# Altium footprint library FootPrintLib_0.PcbLib: 266 footprints (part 13 of 17)
Each footprint in its own frame and in the unit in brackets; x right, y up, seen from the top. Pads: shape width x height; smd on the part's side, far side on the other; paste and mask are expansions set on the pad; w line width, h text height; cw(c..) or ccw(c..) is an arc to the next point about the centre after c.
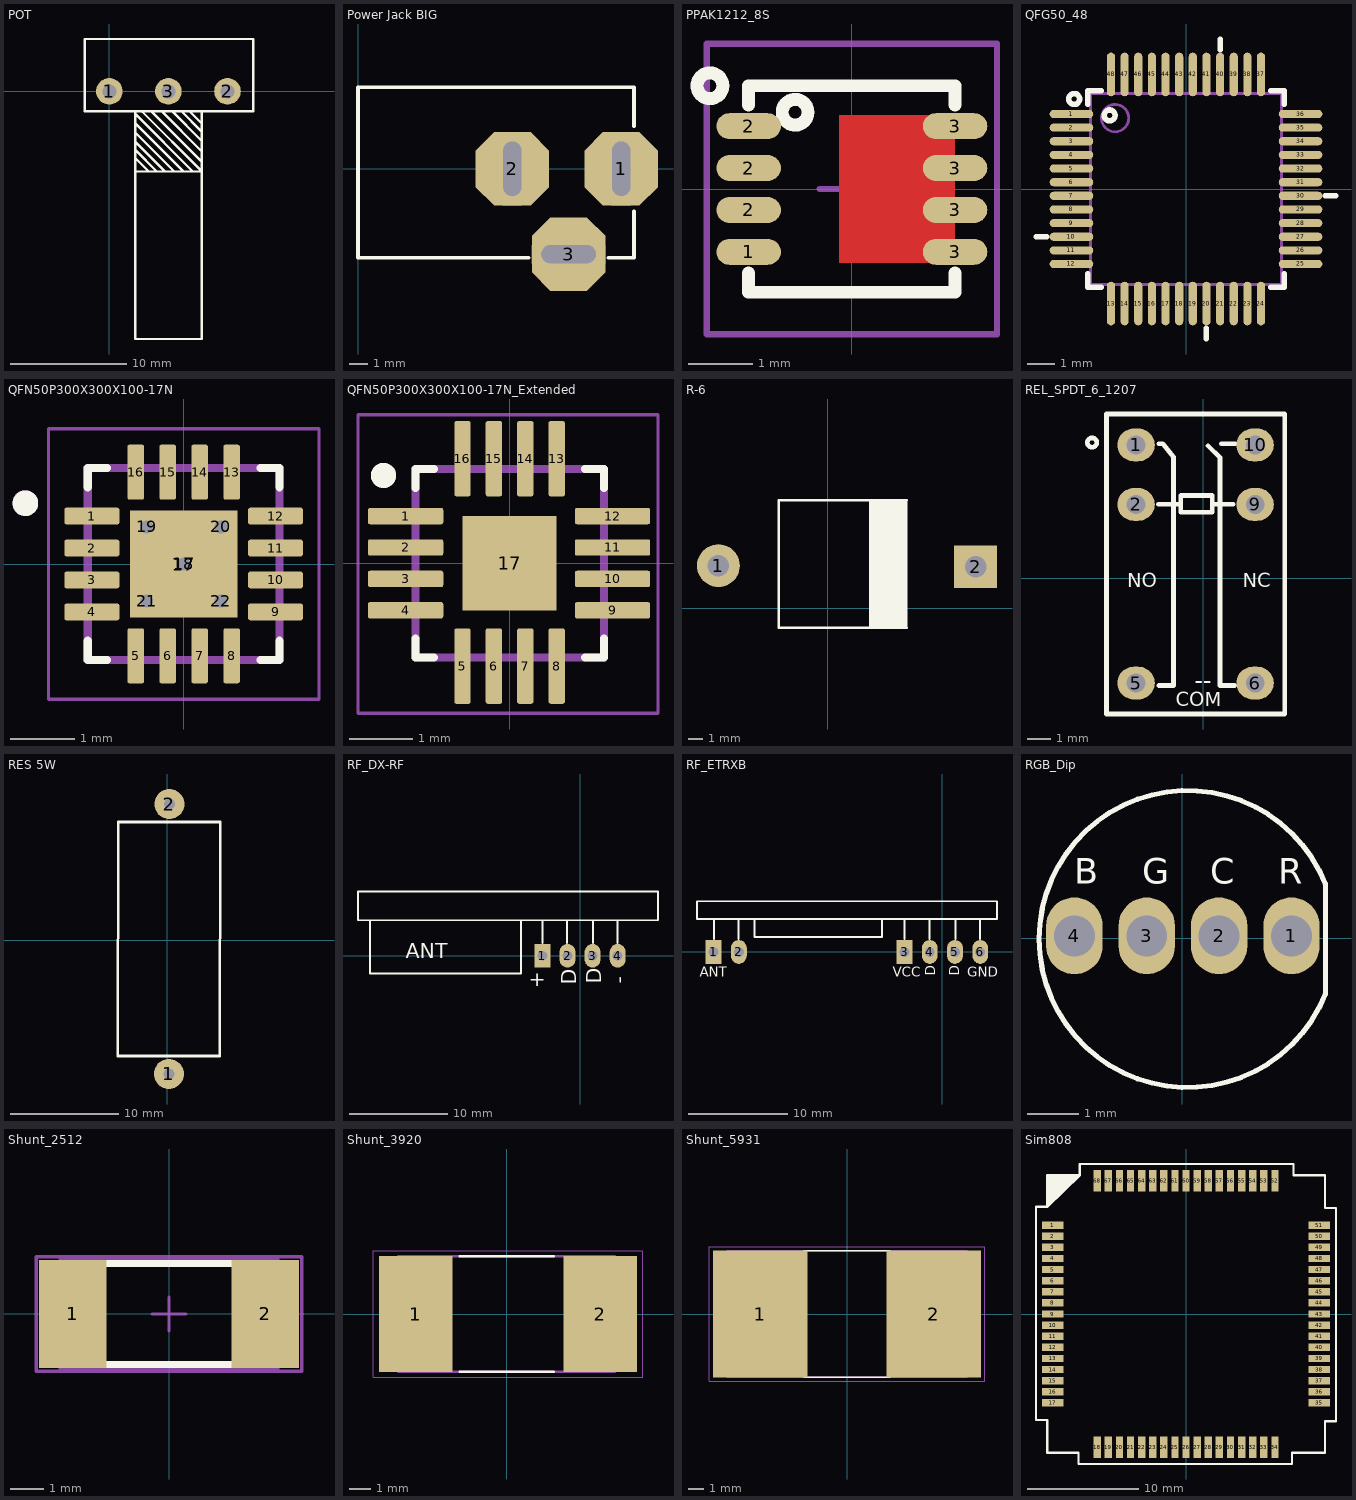
[diagram p12: the footprints below, top view; thin cyan lines are the x and y axes]

## POT [mil] "Voloume"
pads (3):
  round 90 hole 47.24: 1(0,0) 2(400,0) 3(200,0)
Top Overlay:
  lines w7.87: -83.46,177.17 -83.46,-66.93 487.4,-66.93 487.4,177.17 -79.53,177.17 ; 88.19,-271.65 312.6,-271.65 ; 89.76,-228.35 133.07,-271.65 ; 89.76,-200.79 160.63,-271.65 ; 89.76,-173.23 188.19,-271.65 ; 89.76,-141.73 219.69,-271.65 ; 89.76,-110.24 251.18,-271.65 ; 89.76,-78.74 280.71,-269.68 ; 111.42,-68.9 310.24,-267.72 ; 140.94,-66.93 310.24,-236.22 ; 176.38,-66.93 312.2,-202.76 ; 211.81,-66.93 310.24,-165.35 ; 243.31,-66.93 312.2,-135.83 ; 270.87,-66.93 310.24,-106.3 ; 88.19,-838.58 312.6,-838.58 312.6,-66.93 88.19,-66.93 88.19,-838.58
3D body "POT.STEP": height 39.37, standoff -929.98, extent -108.82,-812.91 511.18,193.31
3D body "volome cover2.STEP": height 926.22, standoff 252.56, extent -100.98,-1131.89 496.26,-344.49

## Power Jack BIG [mm] "Power Adaptor Jack"
pads (3):
  oct 4.05x4.05 hole 1 slot 3 at 90 deg: 1(14.5,0) 2(8.5,0)
  oct 4.05x4.05 hole 1 slot 3 at 0 deg: 3(11.6,-4.7)
Top Layer:
  region: 13.5,-1.525 14,-2.025 15,-2.025 15.5,-1.525 15.5,1.525 15,2.025 14,2.025 13.5,1.525
  region: 7.5,-1.525 8,-2.025 9,-2.025 9.5,-1.525 9.5,1.525 9,2.025 8,2.025 7.5,1.525
  region: 13.125,-5.7 13.625,-5.2 13.625,-4.2 13.125,-3.7 10.075,-3.7 9.575,-4.2 9.575,-5.2 10.075,-5.7
Bottom Layer:
  region: 13.5,-1.525 14,-2.025 15,-2.025 15.5,-1.525 15.5,1.525 15,2.025 14,2.025 13.5,1.525
  region: 7.5,-1.525 8,-2.025 9,-2.025 9.5,-1.525 9.5,1.525 9,2.025 8,2.025 7.5,1.525
  region: 13.125,-5.7 13.625,-5.2 13.625,-4.2 13.125,-3.7 10.075,-3.7 9.575,-4.2 9.575,-5.2 10.075,-5.7
Top Overlay:
  lines w0.2: 9.4,-4.9 0,-4.9 0,4.5 15.2,4.5 15.2,2.35 ; 13.8,-4.9 15.2,-4.9 15.2,-2.35
3D body "SW3dPS-PowerJack-2.5x5.7mm.STEP": height 11, standoff -3.5, extent 0,-4.9 15.2,4.5

## PPAK1212_8S [mm] "PowerPAK 1212-8, pitch: 0.65mm 3.3x3.3x1.1mm, PowerDI3333-8"
height 1.1
pads (8):
  oval 1x0.4 smd: 1(-1.6,-0.975) 2(-1.6,-0.325) 2(-1.6,0.325) 2(-1.6,0.975) 3(1.6,-0.975) 3(1.6,-0.325) 3(1.6,0.325) 3(1.6,0.975)
Top Layer:
  rectangle: -0.2,-1.15 1.6,1.15
Top Overlay:
  circle w0.2: c-2.2,1.6 r0.2
  circle w0.2: c-0.88,1.19 r0.2
  lines w0.2: -1.6,-1.3 -1.6,-1.6 1.6,-1.6 1.6,-1.3 ; -1.6,1.3 -1.6,1.6 1.6,1.6 1.6,1.3
Top Solder:
  rectangle: -0.25,-1.25 1.65,1.25
Mechanical 15:
  lines w0.1: -0.5,0 0.5,0 ; 0,-0.5 0,0.5 ; -2.25,-2.25 2.25,-2.25 2.25,2.25 -2.25,2.25 -2.25,-2.25
3D body "User Library-PowerPAK 1212-8-SiS892DN.step": height 1.04, standoff 0, extent -1.65,-1.65 1.65,1.65

## QFG50_48 [mm] "LQFP48, PQFF, PQFG, TSQFP, 48-Leads, Body 7.00x7.00mm, Pitch 0.50mm"
height 1.6
pads (48):
  oval 1.6x0.3 smd mask+0.05: 1(-4.2,2.75) 2(-4.2,2.25) 3(-4.2,1.75) 4(-4.2,1.25) 5(-4.2,0.75) 6(-4.2,0.25) 7(-4.2,-0.25) 8(-4.2,-0.75) 9(-4.2,-1.25) 10(-4.2,-1.75) 11(-4.2,-2.25) 12(-4.2,-2.75) 25(4.2,-2.75) 26(4.2,-2.25) 27(4.2,-1.75) 28(4.2,-1.25) 29(4.2,-0.75) 30(4.2,-0.25) 31(4.2,0.25) 32(4.2,0.75) 33(4.2,1.25) 34(4.2,1.75) 35(4.2,2.25) 36(4.2,2.75)
  oval 0.3x1.6 smd mask+0.05: 13(-2.75,-4.2) 14(-2.25,-4.2) 15(-1.75,-4.2) 16(-1.25,-4.2) 17(-0.75,-4.2) 18(-0.25,-4.2) 19(0.25,-4.2) 20(0.75,-4.2) 21(1.25,-4.2) 22(1.75,-4.2) 23(2.25,-4.2) 24(2.75,-4.2) 37(2.75,4.2) 38(2.25,4.2) 39(1.75,4.2) 40(1.25,4.2) 41(0.75,4.2) 42(0.25,4.2) 43(-0.25,4.2) 44(-0.75,4.2) 45(-1.25,4.2) 46(-1.75,4.2) 47(-2.25,4.2) 48(-2.75,4.2)
Top Overlay:
  circle w0.2: c-2.8,2.7 r0.2
  circle w0.2: c-4.1,3.3 r0.2
  lines w0.2: -5.5,-1.75 -5.1,-1.75 ; -3.6,-3.1 -3.6,-3.6 -3.1,-3.6 ; -3.6,3.1 -3.6,3.6 -3.1,3.6 ; 0.75,-5.5 0.75,-5.1 ; 1.25,5.1 1.25,5.5 ; 3.1,-3.6 3.6,-3.6 3.6,-3.1 ; 3.1,3.6 3.6,3.6 3.6,3.1 ; 5.1,-0.25 5.5,-0.25
Mechanical 13:
  circle w0.1: c-2.6,2.6 r0.5
  lines w0.1: -3.5,-3.5 3.5,-3.5 3.5,3.5 -3.5,3.5 -3.5,-3.5
3D body "LQFP48_Grid_0_5.STEP": height 1.6, standoff 0, extent -4.5,-4.5 4.5,4.5

## QFN50P300X300X100-17N [mm]
pads (22):
  rrect25% 0.86x0.26 smd: 1(-1.435,0.75) 2(-1.435,0.25) 3(-1.435,-0.25) 4(-1.435,-0.75) 9(1.435,-0.75) 10(1.435,-0.25) 11(1.435,0.25) 12(1.435,0.75)
  rrect25% 0.26x0.86 smd: 5(-0.75,-1.435) 6(-0.25,-1.435) 7(0.25,-1.435) 8(0.75,-1.435) 13(0.75,1.435) 14(0.25,1.435) 15(-0.25,1.435) 16(-0.75,1.435)
  rect 1.68x1.68 smd paste-0.31: 17(0,0)
  round 0.4 hole 0.2 mask+0: 18(0,0) 19(-0.58,0.58) 20(0.58,0.58) 21(-0.58,-0.58) 22(0.58,-0.58)
Top Overlay:
  circle w0.2: c-2.475,0.95 r0.1
  lines w0.127: -1.5,-1.2 -1.5,-1.5 -1.2,-1.5 ; -1.5,1.2 -1.5,1.5 -1.2,1.5 ; 1.2,-1.5 1.5,-1.5 1.5,-1.2 ; 1.2,1.5 1.5,1.5 1.5,1.2
Mechanical 13:
  circle w0.2: c-2.475,0.95 r0.1
  lines w0.127: -1.5,-1.5 1.5,-1.5 1.5,1.5 -1.5,1.5 -1.5,-1.5
Mechanical 15:
  lines w0.05: -2.115,-2.115 2.115,-2.115 2.115,2.115 -2.115,2.115 -2.115,-2.115
3D body "step_temp.STEP": height 1, standoff 0, extent -1.5,-1.5 1.5,1.5

## QFN50P300X300X100-17N_Extended [mm]
pads (17):
  rrect25% 1.2x0.26 smd: 1(-1.656,0.75) 2(-1.656,0.25) 3(-1.656,-0.25) 4(-1.656,-0.75) 9(1.638,-0.75) 10(1.638,-0.25) 11(1.638,0.25) 12(1.638,0.75)
  rrect25% 0.26x1.2 smd: 5(-0.75,-1.638) 6(-0.25,-1.638) 7(0.25,-1.638) 8(0.75,-1.638) 13(0.75,1.664) 14(0.25,1.664) 15(-0.25,1.664) 16(-0.75,1.664)
  rect 1.5x1.5 smd paste-0.31: 17(0,0)
Top Overlay:
  circle w0.2: c-2.007,1.397 r0.1
  lines w0.127: -1.5,-1.2 -1.5,-1.5 -1.2,-1.5 ; -1.5,1.2 -1.5,1.5 -1.2,1.5 ; 1.2,-1.5 1.5,-1.5 1.5,-1.2 ; 1.2,1.5 1.5,1.5 1.5,1.2
Mechanical 13:
  circle w0.2: c-2.007,1.397 r0.1
  lines w0.127: -1.5,-1.5 1.5,-1.5 1.5,1.5 -1.5,1.5 -1.5,-1.5
Mechanical 15:
  lines w0.05: -2.413,-2.388 2.362,-2.388 2.362,2.362 -2.413,2.362 -2.413,-2.388
3D body "step_temp.STEP": height 1, standoff 0, extent -1.5,-1.5 1.5,1.5

## R-6 [mm]
height 2.7
pads (2):
  round 3 hole 1.5: 1(-7.645,2.997)
  rect 3x3 hole 1.5: 2(10.338,2.921)
Top Overlay:
  region: 5.588,-1.38 5.588,7.62 2.888,7.62 2.888,-1.38
  lines w0.2: 5.5,-1.35 -3.429,-1.35 -3.429,7.573 5.5,7.573
3D body "User Library-R-6.step": height 9.55, standoff -2, extent -8.183,-1.448 10.897,7.652

## REL_SPDT_6_1207 [mm]
height 10
pads (6):
  oval 1.6x1.4 hole 0.8: 1(-2.87,5.69) 2(-2.87,3.15) 5(-2.87,-4.47) 6(2.21,-4.47) 9(2.21,3.15) 10(2.21,5.69)
Top Overlay:
  circle w0.2: c-4.75,5.791 r0.2
  lines w0.2: -1.93,3.154 -0.991,3.154 ; -1.906,-4.571 -1.271,-4.571 -1.271,-3.471 -1.271,4.029 -1.271,5.152 ; -1.904,5.736 -1.727,5.736 ; -1.701,5.71 -1.269,5.177 ; 0.198,5.657 0.719,5.136 ; 0.381,3.148 1.27,3.154 ; 0.711,5.152 0.711,4.029 0.711,-3.471 0.711,-4.571 1.346,-4.571 ; 0.765,5.736 1.375,5.736 ; -4.13,-5.79 -4.13,7.01 3.47,7.01 3.47,-5.79 -4.13,-5.79 ; -0.965,2.819 0.381,2.819 0.381,3.531 -0.965,3.531 -0.965,2.819
  text "NC" at 1.674,-0.383 h0.6
  text "NO" at -3.254,-0.383 h0.6
  text "--" at 0.359,-4.169 h0.75
  text "COM" at -1.171,-5.463 h0.6
3D body "User Library-G5V-1-1.step": height 10, standoff -3.5, extent -4.023,-5.54 3.277,6.76

## RES 5W [mil]
pads (2):
  round 110 hole 39.37: 1(6,-487) 2(8,497)
Top Overlay:
  lines w10: -179.99,-422 192.01,-422 192.99,432 -179.01,432 -179.99,-422
3D body "User Library-5W1.step": height 354.72, standoff -82.96, extent -180.01,-503.87 194.01,512.16

## RF_DX-RF [mm]
pads (4):
  rect 1.6x2.4 hole 1: 1(-3.81,0)
  oval 1.6x2.4 hole 1: 2(-1.27,0) 3(1.27,0) 4(3.81,0)
Top Overlay:
  lines w0.2: -21.3,3.6 -21.3,-1.8 -6,-1.8 -6,3.6 ; -3.8,1.3 -3.8,3.6 ; -1.3,1.3 -1.3,3.6 ; 1.3,1.3 1.3,3.6 ; 3.8,1.3 3.8,3.6 ; -22.5,3.6 7.9,3.6 7.9,6.5 -22.5,6.5 -22.5,3.6
  text "ANT" at -17.653,-0.254 h1.52
  text "-" at 4.699,-2.81 h1.52
  text "D" at 2.159,-2.81 h1.52
  text "D" at -0.381,-2.937 h1.52
  text "+" at -5.2,-3.1 h1.52
3D body "User Library-XD-RF-5V.STEP": height 14.75, standoff -4.25, extent -22.3,-1.7 7.7,6.3

## RF_ETRXB [mm] "Module RF, Receiver, ET-RXB-12, ET-RXB-22"
pads (6):
  rect 1.6x2.4 hole 1: 1(-23.03,0) 3(-3.81,0)
  oval 1.6x2.4 hole 1: 2(-20.49,0) 4(-1.27,0) 5(1.27,0) 6(3.81,0)
Top Overlay:
  lines w0.2: -23,1.3 -23,3.3 ; -20.5,1.3 -20.5,3.3 ; -18.9,3.3 -18.9,1.5 -6.1,1.5 -6.1,3.3 ; -3.8,1.3 -3.8,3.3 ; -1.3,1.3 -1.3,3.3 ; 1.3,1.3 1.3,3.3 ; 3.8,1.3 3.8,3.3 ; -24.7,3.3 -24.7,5.1 5.5,5.1 5.5,3.3 -24.7,3.3
  text "VCC" at -5,-2.5 h1
  text "D" at -0.7,-2.4 h1
  text "D" at 1.7,-2.4 h1
  text "GND" at 2.5,-2.5 h1
  text "ANT" at -24.4,-2.5 h1
3D body "RF_ETRXB.step": height 8.5, standoff -6.05, extent -24.6,-2.05 5.4,6.4

## RGB_Dip [mm]
pads (4):
  oval 1.1x1.5 hole 0.8: 1(2.134,0.051) 2(0.72,0.051) 3(-0.694,0.051) 4(-2.108,0.051)
Top Overlay:
  lines w0.1: 2.794,-1.092 cw(c0.103,-0.011) 2.794,1.071 ; 2.8,-1.092 2.8,1.059
  text "R" at 1.88,1.067 h0.5
  text "C" at 0.55,1.067 h0.5
  text "G" at -0.779,1.067 h0.5
  text "B" at -2.108,1.067 h0.5
3D body "User Library-LED_5MM_RGB v4.STEP": height 8.09, standoff -6.6, extent -3.003,-2.997 2.597,3.003

## Shunt_2512 [mm] "Chip Resistor, 2-Leads, Body 6.3x3.1mm, IPC High Density _ (0.500 W)"
height 0.7
pads (2):
  rect 2x3.2 smd: 1(-2.85,0) 2(2.85,0)
Top Overlay:
  lines w0.2: -1.9,-1.5 1.9,-1.5 ; -1.9,1.5 1.9,1.5
Mechanical 13:
  lines w0.1: -3.225,-1.625 3.225,-1.625 3.225,1.625 -3.225,1.625 -3.225,-1.625
Mechanical 15:
  lines w0.1: -0.5,0 0.5,0 ; 0,-0.5 0,0.5 ; -3.937,-1.7 3.937,-1.7 3.937,1.7 -3.937,1.7 -3.937,-1.7
3D body "Shunt_Resistors-PSL2(2512).step": height 1.12, standoff 0, extent -3.277,-1.524 3.023,1.626

## Shunt_3920 [mm]
pads (2):
  rect 3.5x5.51 smd: 1(-4.318,0) 2(4.445,0)
Top Overlay:
  lines w0.127: -2.23,-2.75 2.23,-2.75 ; -2.23,2.75 2.23,2.75
Mechanical 13:
  lines w0.127: -5.15,-2.75 -5.15,2.75 5.15,2.75 5.15,-2.75 -5.15,-2.75
Mechanical 15:
  lines w0.05: -6.35,-3.005 -6.35,3.005 6.477,3.005 6.477,-3.005 -6.35,-3.005
3D body "Shunt_Resistors-PSJ2(3920).step": height 1.27, standoff 0, extent -4.873,-2.54 5.127,2.66

## Shunt_5931 [mm]
pads (2):
  rect 6x8.06 smd: 1(-5.527,0) 2(5.527,0)
Top Overlay:
  lines w0.127: -2.73,-4.03 2.73,-4.03 ; -2.73,4.03 2.73,4.03
Mechanical 13:
  lines w0.127: -7.65,-4.03 -7.65,4.03 7.65,4.03 7.65,-4.03 -7.65,-4.03
Mechanical 15:
  lines w0.05: -8.763,-4.28 -8.763,4.28 8.763,4.28 8.763,-4.28 -8.763,-4.28
3D body "Shunt_Resistors-PU5931(5931).step": height 1.1, standoff 0, extent -7.627,-3.94 7.373,3.81

## Sim808 [mil] "Bastam Beyrami"
pads (68):
  rect 76x26 smd: 1(-472.44,314.96) 2(-472.44,275.59) 3(-472.44,236.22) 4(-472.44,196.85) 5(-472.44,157.48) 6(-472.44,118.11) 7(-472.44,78.74) 8(-472.44,39.37) 9(-472.44,0) 10(-472.44,-39.37) 11(-472.44,-78.74) 12(-472.44,-118.11) 13(-472.44,-157.48) 14(-472.44,-196.85) 15(-472.44,-236.22) 16(-472.44,-275.59) 17(-472.44,-314.96) 35(472.44,-314.96) 36(472.44,-275.59) 37(472.44,-236.22) 38(472.44,-196.85) 39(472.44,-157.48) 40(472.44,-118.11) 41(472.44,-78.74) 42(472.44,-39.37) 43(472.44,0) 44(472.44,39.37) 45(472.44,78.74) 46(472.44,118.11) 47(472.44,157.48) 48(472.44,196.85) 49(472.44,236.22) 50(472.44,275.59) 51(472.44,314.96)
  rect 26x76 smd: 18(-314.96,-472.44) 19(-275.59,-472.44) 20(-236.22,-472.44) 21(-196.85,-472.44) 22(-157.48,-472.44) 23(-118.11,-472.44) 24(-78.74,-472.44) 25(-39.37,-472.44) 26(0,-472.44) 27(39.37,-472.44) 28(78.74,-472.44) 29(118.11,-472.44) 30(157.48,-472.44) 31(196.85,-472.44) 32(236.22,-472.44) 33(275.59,-472.44) 34(314.96,-472.44) 52(314.96,472.44) 53(275.59,472.44) 54(236.22,472.44) 55(196.85,472.44) 56(157.48,472.44) 57(118.11,472.44) 58(78.74,472.44) 59(39.37,472.44) 60(0,472.44) 61(-39.37,472.44) 62(-78.74,472.44) 63(-118.11,472.44) 64(-157.48,472.44) 65(-196.85,472.44) 66(-236.22,472.44) 67(-275.59,472.44) 68(-314.96,472.44)
Top Overlay:
  region: -374,490 -491.03,491 -491.03,376.6
  lines w7.87: -492.13,-492.13 -492.13,-376 -532,-376 -532,380.5 -492.13,380.5 -492.13,492 ; -492.13,492.13 -377,492.13 -377,531.5 380,531.5 ; -492,-492.13 -381,-492.13 -381,-531.5 376,-531.5 376,-492.13 492.13,-492.13 ; 380.5,531 380.5,492.13 492,492.13 ; 492.13,-492 492.13,-380.5 531.5,-380.5 531.5,376 492.13,376 492.13,492.13
3D body "User Library-SIM808.step": height 110.24, standoff -3.94, extent -472.44,-472.44 472.44,472.44